# Altium schematic symbol library 4.7µF_50V、X7R、1206_CL31B475KBHNNNE.SCHLIB: 1 symbol
Pins are listed as number, name and electrical type; pins without a type are passive.

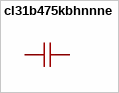
[diagram p0: symbol cl31b475kbhnnne]

## cl31b475kbhnnne
designator C??  (value not drawn)
容值:4.7uF;精度:±10%;额定电压:50V;温度系数:X7R;; Manufacturer: SAMSUNG(三星); AddInBom: yes; ModelId: e4be705b945545a48e666415e3682bd8; ModelName: C1206_L3.2-W1.6-H1.3; ModelTransform: 125.984,62.992,0,0,0,0,0,0,0; Value: 4.7uF; Tolerance: ±10%; Voltage Rating: 50V; Temperature Coefficient: X7R; Symbol: CL31B475KBHNNNE; LCSC Part Name: 4.7uF ±10% 50V; SupplierPart: C51205; ManufacturerPart: CL31B475KBHNNNE; Supplier Footprint: 1206; JLCPCB Part Class: Extended Part; Datasheet: https://item.szlcsc.com/datasheet/CL31B475KBHNNNE/52218.html; Supplier: LCSC; ConvertToPcb: yes; FootprintName: C1206
footprint C1206
pins: 1, 2